# Altium schematic symbol library flyback.SchLib: 6 symbols
Pins are listed as number, name and electrical type; pins without a type are passive.

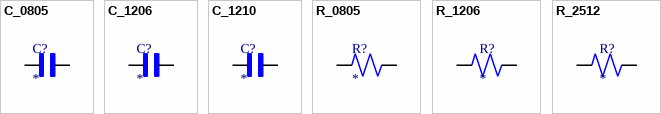
[diagram p0: symbols C_0805 to R_2512]

## C_0805
designator C?
Value: *
footprint CAPC2012X145N (C-0805 Cap)
pins: 1, 2

## C_1206
designator C?
Value: *
footprint CAPC3216X180N (C-1206 Cap)
pins: 1, 2

## C_1210
designator C?
Value: *
footprint CAPC3225X280N (C-1210 Cap)
pins: 1, 2

## R_0805
designator R?
Value: *
footprint RESC2012X60N (R-0805 Res)
pins: 1, 2

## R_1206
designator R?
Value: *
footprint RESC3216X65N (R-1206 Res)
pins: 1, 2

## R_2512
designator R?
Value: *
footprint RESC6432X65N (R-2512 Res)
pins: 1, 2